# Altium footprint library RBM_ALTIUM_PCB_LIBRARY.PcbLib: 107 footprints (part 3 of 7)
Each footprint in its own frame and in the unit in brackets; x right, y up, seen from the top. Pads: shape width x height; smd on the part's side, far side on the other; paste and mask are expansions set on the pad; w line width, h text height; cw(c..) or ccw(c..) is an arc to the next point about the centre after c.
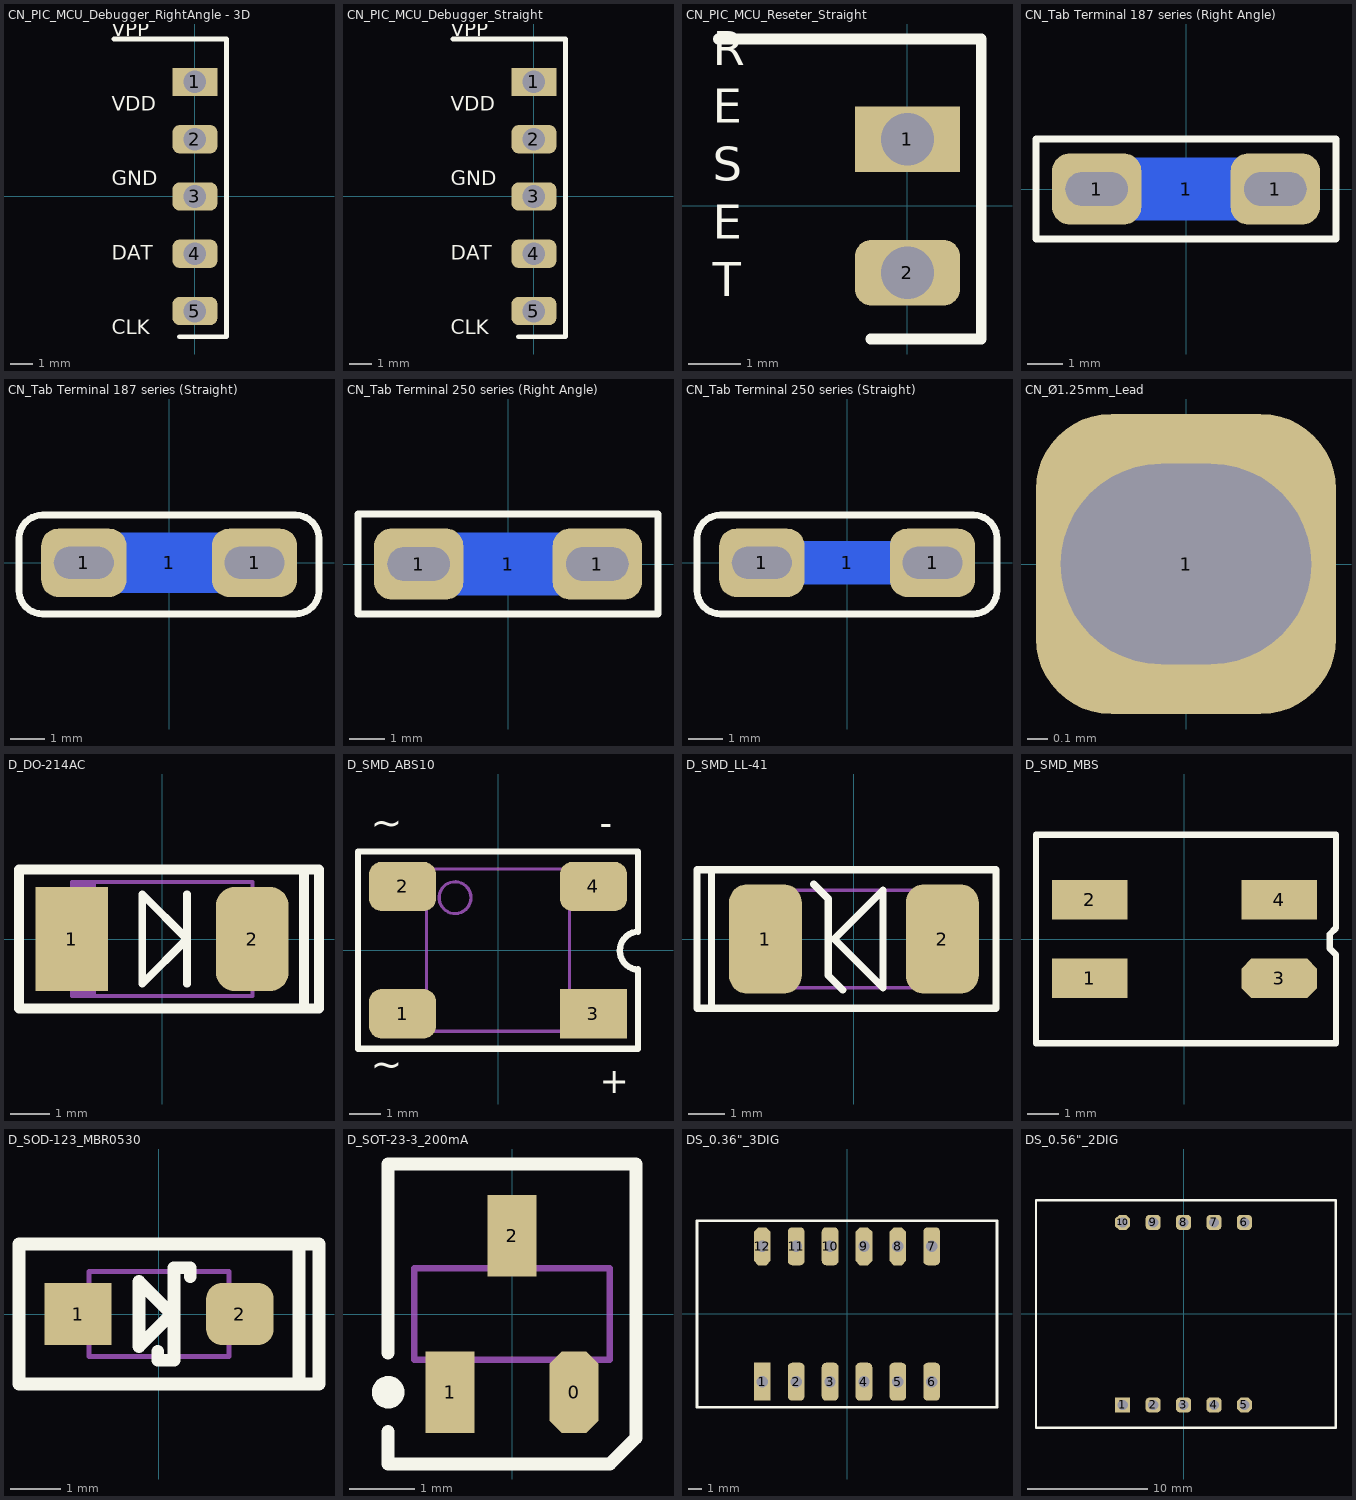
[diagram p2: the footprints below, top view; thin cyan lines are the x and y axes]

## CN_PIC_MCU_Debugger_RightAngle - 3D [mm] "2.54mmPitch, 5pins, StraightType, Male Connector"
pads (5):
  rect 2x1.25 hole 1: 1(0,5.08)
  rrect50% 2x1.25 hole 1: 2(0,2.54) 3(0,0) 4(0,-2.54) 5(0,-5.08)
Top Overlay:
  lines w0.203: -3.6,6.985 1.4,6.985 1.4,-6.22 -0.7,-6.22
  text "VPP /  /  / VDD /  /  / GND /  /  / DAT /  /  / CLK" at -3.7,-6.32 h1.1
Bottom Overlay:
  lines w0.203: -3.6,6.98 1.4,6.98 1.4,-6.225 -0.7,-6.225
  text "VPP /  /  / VDD /  /  / GND /  /  / DAT /  /  / CLK" at -1.3,-6.32 h1.1
3D body "5-Way 2.54mm Right Angle Male Header.STEP": height 2.51, standoff -3, extent -0.365,-6.32 9.765,6.38

## CN_PIC_MCU_Debugger_Straight [mm] "2.54mmPitch, 5pins, StraightType, Male Connector"
pads (5):
  rect 2x1.25 hole 1: 1(0,5.08)
  rrect50% 2x1.25 hole 1: 2(0,2.54) 3(0,0) 4(0,-2.54) 5(0,-5.08)
Top Overlay:
  lines w0.203: -3.6,6.985 1.4,6.985 1.4,-6.22 -0.7,-6.22
  text "VPP /  /  / VDD /  /  / GND /  /  / DAT /  /  / CLK" at -3.7,-6.32 h1.1
Bottom Overlay:
  lines w0.203: -3.6,6.98 1.4,6.98 1.4,-6.225 -0.7,-6.225
  text "VPP /  /  / VDD /  /  / GND /  /  / DAT /  /  / CLK" at -1.3,-6.32 h1.1
3D body "5Pins 2.54mm Male Header.STEP": height 8.54, standoff -3, extent -1.245,-6.35 1.245,6.35

## CN_PIC_MCU_Reseter_Straight [mm] "2.54mmPitch, 2pins, StraightType, Male Connector"
pads (2):
  rect 2x1.25 hole 1: 1(0,1.27)
  rrect50% 2x1.25 hole 1: 2(0,-1.27)
Top Overlay:
  lines w0.203: -3.6,3.175 1.4,3.175 1.4,-2.53 -0.7,-2.53
  text "R / E / S / E / T" at -3.7,-1.93 h1.1
Bottom Overlay:
  lines w0.203: -3.6,3.17 1.4,3.17 1.4,-2.53 -0.7,-2.53
  text "R / E / S / E / T" at -1.3,-1.93 h1.1
3D body "User Library-Header_Male_2Pin.STEP": height 8.54, standoff -3, extent -1.245,-2.54 1.245,2.54

## CN_Tab Terminal 187 series (Right Angle) [mm]
pads (3):
  rrect50% 2.5x2 hole 0.95 slot 1.75 at 0 deg: 1(-2.5,0) 1(2.5,0)
  rect 2.85x1.75 smd far side: 1(0,0)
Top Overlay:
  lines w0.2: -4.2,-1.397 -4.2,1.397 4.2,1.397 4.2,-1.397 -4.2,-1.397
3D body "4.8mm PCB Tab Terminal (Right Angle).stp": height 9.3, standoff -3.7, extent -3.3,-0.4 9.5,0.4

## CN_Tab Terminal 187 series (Straight) [mm]
pads (3):
  rrect50% 2.5x2 hole 0.95 slot 1.75 at 0 deg: 1(-2.5,0) 1(2.5,0)
  rect 2.85x1.75 smd far side: 1(0,0)
Top Overlay:
  lines w0.2: -4.4,-0.81 ccw(c-3.712,-0.81) -3.712,-1.498 3.7,-1.497 ccw(c3.7,-0.81) 4.388,-0.81 ; -4.4,-0.8 -4.4,0.712 ; -4.4,0.71 cw(c-3.712,0.71) -3.712,1.398 ; -3.712,1.397 3.7,1.397 ; 3.7,1.398 cw(c3.7,0.71) 4.388,0.71 ; 4.388,-0.812 4.388,0.7
3D body "4.8mm PCB Tab Terminal (Straight).stp": height 9, standoff -3.45, extent -3.962,-1.3 3.962,1.494

## CN_Tab Terminal 250 series (Right Angle) [mm]
pads (3):
  rrect50% 2.5x2 hole 0.95 slot 1.75 at 0 deg: 1(-2.5,0) 1(2.5,0)
  rect 2.85x1.75 smd far side: 1(0,0)
Top Overlay:
  lines w0.2: -4.2,-1.397 -4.2,1.397 4.2,1.397 4.2,-1.397 -4.2,-1.397
3D body "6.3mm PCB Tab Terminal (Right Angle).STEP": height 9.1, standoff -2.9, extent -4,-0.4 12.2,0.4

## CN_Tab Terminal 250 series (Straight) [mm]
pads (3):
  rrect50% 2.5x2 hole 0.95 slot 1.75 at 0 deg: 1(-2.5,0) 1(2.5,0)
  rect 2.85x1.25 smd far side: 1(0,0)
Top Overlay:
  lines w0.2: -4.4,-0.81 ccw(c-3.712,-0.81) -3.712,-1.498 3.7,-1.497 ccw(c3.7,-0.81) 4.388,-0.81 ; -4.4,-0.8 -4.4,0.712 ; -4.4,0.71 cw(c-3.712,0.71) -3.712,1.398 ; -3.712,1.397 3.7,1.397 ; 3.7,1.398 cw(c3.7,0.71) 4.388,0.71 ; 4.388,-0.812 4.388,0.7
3D body "6.3mm PCB Tab Terminal (Straight).stp": height 10.2, standoff -3.8, extent -4,-0.4 4,0.4

## CN_Ø1.25mm_Lead [mm] "Lead Wire"
pads (1):
  rrect50% 1.5x1.5 / inner rrect50% 1.5x1.5 / far side rrect50% 2.5x1.5 hole 1.25 slot 1 at 90 deg: 1(0,0)

## D_DO-214AC [mm] "RS1M; 1000V 1A 1.3V @ 1A 500ns SMA Diodes - Rectifiers - Fast Recovery RoHS"
height 2.44
pads (2):
  rect 1.85x2.65 smd: 1(-2.3,0)
  rrect50% 1.85x2.65 smd: 2(2.3,0)
Top Overlay:
  lines w0.2: 0.635,-1.143 0.635,1.143 ; -0.508,-1.143 -0.508,1.143 0.635,0 -0.508,-1.143
  lines w0.254: 3.619,-1.778 3.619,1.778 ; -3.65,-1.778 -3.65,1.778 4,1.778 4,-1.778 -3.65,-1.778
Mechanical 13:
  rectangle: -2.3,-1.45 -1.681,1.45
  lines w0.1: -2.3,-1.45 -2.3,1.45 2.3,1.45 2.3,-1.45 -2.3,-1.45
3D body "DIOM4327X24N.step": height 2.44, standoff 0, extent -2.52,-1.45 2.52,1.45

## D_SMD_ABS10 [mm]
pads (4):
  rrect50% 2.1x1.55 smd: 1(-3,-2) 2(-3,2) 4(3,2)
  rect 2.1x1.55 smd: 3(3,-2)
Top Overlay:
  lines w0.2: 4.299,-0.603 cw(c4.427,-0.017) 4.306,0.57 ; 4.4,-0.603 4.4,-3.1 -4.4,-3.1 -4.4,3.1 4.4,3.1 4.4,0.57
  text "~" at -4,3.3 h1.5
  text "+" at 3.2,-3.8 h0.8
  text "-" at 3.2,4.2 h0.8
  text "~" at -4,-4.3 h1.5
Mechanical 13:
  circle w0.1: c-1.35,1.65 r0.5
  lines w0.1: -2.25,-2.55 2.25,-2.55 2.25,2.55 -2.25,2.55 -2.25,-2.55
3D body "TSOP400P650X160-4N.step": height 1.6, standoff 0, extent -3.25,-2.55 3.25,2.55

## D_SMD_LL-41 [mm]
height 2.67
pads (2):
  rrect50% 2x3 smd: 1(-2.425,0) 2(2.425,0)
Top Overlay:
  lines w0.2: -3.9,-1.8 -3.9,1.8 ; -1.1,1.5 -0.7,1.1 -0.7,-1 -0.3,-1.4 ; -4.3,-1.9 -4.3,1.9 3.9,1.9 3.9,-1.9 -4.3,-1.9 ; -0.535,0 0.8,-1.335 0.8,1.335 -0.535,0
Mechanical 13:
  lines w0.1: -2.75,-1.335 2.75,-1.335 2.75,1.335 -2.75,1.335 -2.75,-1.335
3D body "ZD.step": height 2.46, standoff 0.01, extent -2.575,-1.227 2.575,1.228

## D_SMD_MBS [mm] "MB10S-10; MBS Bridge Rectifiers RoHS"
pads (4):
  rect 2.4x1.25 smd: 1(-3,-1.25) 2(-3,1.25) 4(3,1.25)
  oct 2.4x1.25 smd: 3(3,-1.25)
Top Overlay:
  lines w0.2: -4.7,-3.3 4.8,-3.3 4.8,-0.5 4.6,-0.3 4.6,0.15 4.8,0.35 4.8,3.3 -4.7,3.3 -4.7,-3.3
3D body "User Library-MB10F TMBS.step": height 1.61, standoff 0, extent -3.4,-2.45 3.4,2.45

## D_SOD-123_MBR0530 [mm] "Schottky diode 30V/0.5A SOD-123"
height 1.25
pads (2):
  rect 1.35x1.25 smd: 1(-1.62,0)
  rrect50% 1.35x1.25 smd: 2(1.62,0)
Top Overlay:
  lines w0.254: -0.025,-0.75 -0.025,-0.925 0.1,-0.925 0.3,-0.925 0.3,0.925 0.5,0.925 0.625,0.925 0.625,0.75 ; 0.3,-0.05 -0.4,0.65 -0.4,-0.65 0.3,0.05 ; 2.8,-1.4 2.8,1.4 ; -2.8,-1.4 -2.8,1.4 3.2,1.4 3.2,-1.4 -2.8,-1.4
Assembly Top:
  lines w0.1: -1.4,-0.85 -1.4,0.85 1.4,0.85 1.4,-0.85 -1.4,-0.85
3D body "SODFL370X125-2N.step": height 1.25, standoff 0, extent -1.85,-0.85 1.85,0.85

## D_SOT-23-3_200mA [mm] "Diodes - General Purpose 100V 200mA 1.25V @ 200mA SOT-23(SOT-23-3) RoHS"
height 1.15
pads (3):
  oct 0.75x1.25 smd: 0(0.95,-1.2)
  rect 0.75x1.25 smd: 1(-0.95,-1.2) 2(0,1.2)
Top Overlay:
  circle w0.25: c-1.9,-1.2 r0.125
  lines w0.2: -1.9,-1.8 -1.9,-2.3 1.5,-2.3 1.9,-1.9 1.9,2.3 -1.9,2.3 -1.9,-0.6
Mechanical 13:
  lines w0.1: -1.5,-0.7 -1.5,0.7 1.5,0.7 1.5,-0.7 -1.5,-0.7
3D body "SOT95P245X115-3N.step": height 1.15, standoff 0, extent -1.5,-1.3 1.5,1.3

## DS_0.36"_3DIG [mm] "SLR0363DWC1BD"
pads (12):
  rect 1.25x2.85 hole 0.85: 1(-6.35,-5.08)
  rrect50% 1.25x2.85 hole 0.85: 2(-3.81,-5.08) 3(-1.27,-5.08) 4(1.27,-5.08) 5(3.81,-5.08) 6(6.35,-5.08) 7(6.35,5.08) 10(-1.27,5.08) 11(-3.81,5.08)
  oct 1.25x2.85 hole 0.85: 8(3.81,5.08) 9(1.27,5.08) 12(-6.35,5.08)
Top Overlay:
  lines w0.2: -11.25,-7 11.25,-7 11.25,7 -11.25,7 -11.25,-7
Bottom Overlay:
  text "D1" at -5.67,1.45 h1
  text "D2" at 2.13,1.45 h1
  text "D3" at 4.64,1.45 h1
  text "d" at -3.5,-2.25 h1
  text "dp" at -0.5,-2.25 h1
  text "e" at -6.1,-2.25 h1
  text "c" at 1.6,-2.25 h1
  text "g" at 4.1,-2.25 h1
  text "f" at -1.07,1.45 h1
  text "b" at 6.73,1.45 h1
  text "a" at -3.37,1.45 h1
3D body "User Library-atd-036ab.step": height 7.2, standoff -3.05, extent -11.3,-7.05 11.3,7.05

## DS_0.56"_2DIG [mm]
pads (10):
  rect 1.25x1.25 / inner rect 1.25x2.85 / far side rect 1.25x2.85 hole 0.85: 1(-5.08,-7.62)
  rrect50% 1.25x1.25 / inner rrect50% 1.25x2.85 / far side rrect50% 1.25x2.85 hole 0.85: 2(-2.54,-7.62) 3(0,-7.62) 4(2.54,-7.62) 6(5.08,7.62) 7(2.54,7.62) 8(0,7.62) 9(-2.54,7.62)
  oct 1.25x1.25 / inner oct 1.25x2.85 / far side oct 1.25x2.85 hole 0.85: 5(5.08,-7.62) 10(-5.08,7.62)
Top Overlay:
  lines w0.2: -12.319,-9.525 -12.319,9.475 12.7,9.475 12.7,-9.525 ; -12.28,-9.525 12.72,-9.525
Bottom Overlay:
  text "D2" at 5.8,-5 h1
  text "D1" at -4.4,4.1 h1
  text "a" at 2.9,4.167 h1
  text "b" at 5.38,4.167 h1
  text "f" at 0.301,4.167 h1
  text "g" at -2.24,4.3 h1
  text "c" at 2.742,-4.833 h1
  text "e" at 0.201,-4.833 h1
  text "dp" at -1.738,-4.9 h1
  text "d" at -4.878,-4.833 h1
3D body: height 7, standoff 1, extent -12.319,-9.525 12.7,9.398
3D body: height 3, standoff -3, extent -5.338,7.361 -4.82,7.88
3D body: height 3, standoff -3, extent -2.798,7.361 -2.28,7.88
3D body: height 3, standoff -3, extent -0.258,7.361 0.26,7.88
3D body: height 3, standoff -3, extent 2.282,7.361 2.8,7.88
3D body: height 3, standoff -3, extent 4.822,7.361 5.34,7.88
3D body: height 3, standoff -3, extent -5.338,-7.879 -4.82,-7.36
3D body: height 3, standoff -3, extent 4.822,-7.879 5.34,-7.36
3D body: height 3, standoff -3, extent 2.282,-7.879 2.8,-7.36
3D body: height 3, standoff -3, extent -0.258,-7.879 0.26,-7.36
3D body: height 3, standoff -3, extent -2.798,-7.879 -2.28,-7.36
3D body: height 7, standoff 1, extent -12.3,-9.313 12.719,9.61